# Altium footprint library Footprints.PcbLib: 320 footprints (part 1 of 20)
Each footprint in its own frame and in the unit in brackets; x right, y up, seen from the top. Pads: shape width x height; smd on the part's side, far side on the other; paste and mask are expansions set on the pad; w line width, h text height; cw(c..) or ccw(c..) is an arc to the next point about the centre after c.
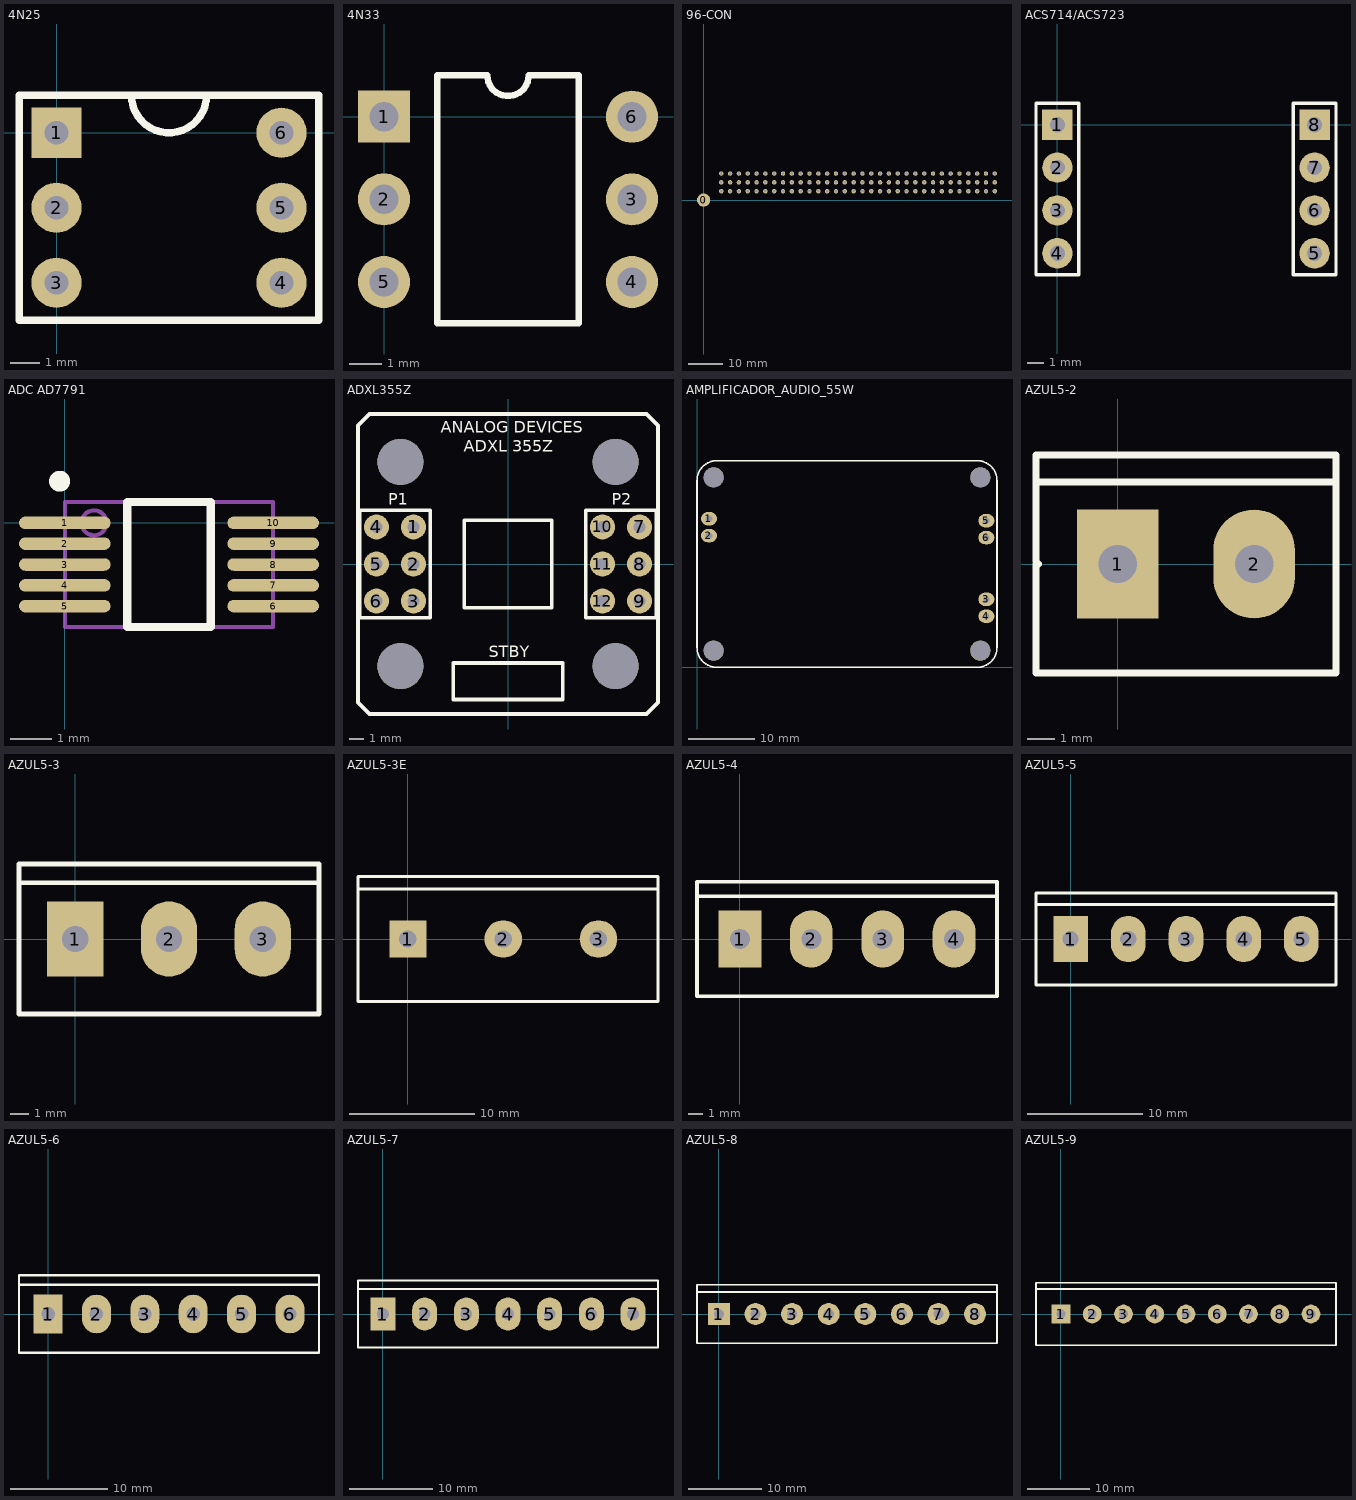
[diagram p0: the footprints below, top view; thin cyan lines are the x and y axes]

## 4N25 [mm]
pads (6):
  rect 1.7x1.7 hole 0.8: 1(0,0)
  round 1.7 hole 0.8: 2(0,-2.54) 3(0,-5.08) 4(7.62,-5.08) 5(7.62,-2.54) 6(7.62,0)
Top Overlay:
  lines w0.254: 2.54,1.27 ccw(c3.81,1.27) 5.08,1.27 ; -1.27,-6.35 8.89,-6.35 8.89,1.27 -1.27,1.27 -1.27,-6.35

## 4N33 [mm]
pads (6):
  rect 1.6x1.6 hole 0.9: 1(0,0)
  round 1.6 hole 0.9: 2(0,-2.54) 3(7.62,-2.54) 4(7.62,-5.08) 5(0,-5.08) 6(7.62,0)
Top Overlay:
  lines w0.2: 1.635,-6.35 1.635,1.27 3.175,1.27 ccw(c3.81,1.27) 4.445,1.27 5.985,1.27 5.985,-6.35 1.635,-6.35

## 96-CON [mil]
pads (97):
  round 150 hole 30: 0(0,0)
  round 50 hole 30: 1(3300,300) 2(3200,300) 3(3100,300) 4(3000,300) 5(2900,300) 6(2800,300) 7(2700,300) 8(2600,300) 9(2500,300) 10(2400,300) 11(2300,300) 12(2200,300) 13(2100,300) 14(2000,300) 15(1900,300) 16(1800,300) 17(1700,300) 18(1600,300) 19(1500,300) 20(1400,300) 21(1300,300) 22(1200,300) 23(1100,300) 24(1000,300) 25(900,300) 26(800,300) 27(700,300) 28(600,300) 29(500,300) 30(400,300) 31(300,300) 32(200,300) 33(3300,200) 34(3200,200) 35(3100,200) 36(3000,200) 37(2900,200) 38(2800,200) 39(2700,200) 40(2600,200) 41(2500,200) 42(2400,200) 43(2300,200) 44(2200,200) 45(2100,200) 46(2000,200) 47(1900,200) 48(1800,200) 49(1700,200) 50(1600,200) 51(1500,200) 52(1400,200) 53(1300,200) 54(1200,200) 55(1100,200) 56(1000,200) 57(900,200) 58(800,200) 59(700,200) 60(600,200) 61(500,200) 62(400,200) 63(300,200) 64(200,200) 65(3300,100) 66(3200,100) 67(3100,100) 68(3000,100) 69(2900,100) 70(2800,100) 71(2700,100) 72(2600,100) 73(2500,100) 74(2400,100) 75(2300,100) 76(2200,100) 77(2100,100) 78(2000,100) 79(1900,100) 80(1800,100) 81(1700,100) 82(1600,100) 83(1500,100) 84(1400,100) 85(1300,100) 86(1200,100) 87(1100,100) 88(1000,100) 89(900,100) 90(800,100) 91(700,100) 92(600,100) 93(500,100) 94(400,100) 95(300,100) 96(200,100)

## ACS714/ACS723 [mm]
pads (8):
  rect 1.8x1.8 hole 0.9: 1(0,0) 8(15.24,0)
  round 1.8 hole 0.9: 2(0,-2.54) 3(0,-5.08) 4(0,-7.62) 5(15.24,-7.62) 6(15.24,-5.08) 7(15.24,-2.54)
Top Overlay:
  lines w0.2: 1.27,-0.635 1.27,1.27 ; 16.51,-0.635 16.51,1.27 ; 1.27,1.27 -1.27,1.27 -1.27,-8.89 1.27,-8.89 1.27,1.27 ; 16.51,1.27 13.97,1.27 13.97,-8.89 16.51,-8.89 16.51,1.27
3D body: height 0, standoff 0, extent -1.27,-8.89 16.51,1.27

## ADC AD7791 [mm]
pads (10):
  oval 2.2x0.3 smd: 1(0,0) 2(0,-0.5) 3(0,-1) 4(0,-1.5) 5(0,-2) 6(5,-2) 7(5,-1.5) 8(5,-1) 9(5,-0.5) 10(5,0)
Top Overlay:
  circle w0.25: c-0.125,1 r0.125
  lines w0.2: 1.5,-2.5 3.5,-2.5 3.5,0.5 1.5,0.5 1.5,-2.5
Mechanical 13:
  circle w0.1: c0.7,0 r0.3
  lines w0.1: 0,-2.5 0,0.5 5,0.5 5,-2.5 0,-2.5
3D body: height 1.75, standoff 0, extent 0,-2.5 5,0.5

## ADXL355Z [mm]
pads (16):
  round 1.7 hole 0.8: 1(-6.48,2.54) 2(-6.48,0) 3(-6.48,-2.54) 4(-9.02,2.54) 5(-9.02,0) 6(-9.02,-2.54) 7(9.02,2.54) 8(9.02,0) 9(9.02,-2.54) 10(6.48,2.54) 11(6.48,0) 12(6.48,-2.54)
  round 3.15 hole 3.15: ""(-7.375,-7) ""(-7.375,7) ""(7.375,-7) ""(7.375,7)
Top Overlay:
  lines w0.254: -10.287,-9.5 -9.5,-10.287 9.5,-10.287 10.287,-9.5 10.287,9.5 9.5,10.287 -9.5,10.287 -10.287,9.5 -10.287,-9.5 ; -10.16,-3.683 -10.16,3.683 -5.334,3.683 -5.334,-3.683 -10.16,-3.683 ; -3.75,-9.287 3.75,-9.287 3.75,-6.787 -3.75,-6.787 -3.75,-9.287 ; -3,-3 -3,3 3,3 3,-3 -3,-3 ; 5.334,-3.683 5.334,3.683 10.16,3.683 10.16,-3.683 5.334,-3.683
  text "P1" at -8.198,4.064 h0.8
  text "P2" at 7.124,4.064 h0.8
  text "STBY" at -1.331,-6.406 h0.8
  text "ANALOG DEVICES" at -4.624,9 h0.8
  text "ADXL 355Z" at -3.032,7.713 h0.8

## AMPLIFICADOR_AUDIO_55W [mm]
pads (10):
  oval 2.4x2 hole 1: 1(1.8,22.3) 2(1.8,19.76) 3(43.4,10.2) 4(43.4,7.66) 5(43.4,22) 6(43.4,19.46)
  round 3 hole 3: ""(2.5,2.5) ""(2.5,28.5) ""(42.5,2.5) ""(42.5,28.5)
Top Overlay:
  lines w0.25: 0,3 ccw(c3,3) 3,0 42,0 ccw(c42,3) 45,3 45,28 ccw(c42,28) 42,31 3,31 ccw(c3,28) 0,28 0,3
3D body "Driver TDA8932BT.step": height 11.9, standoff -6.69, extent 0,0 45,31

## AZUL5-2 [mm]
pads (2):
  rect 3x4 hole 1.4: 1(0,0)
  oval 3x4 hole 1.4: 2(5,0)
Top Overlay:
  lines w0.254: -3,0 -3,-4 8,-4 8,4 -3,4 -3,0.1 -2.9,0 ; -3,3 8,3

## AZUL5-3 [mm]
pads (3):
  rect 3x4 hole 1.4: 1(0,0)
  oval 3x4 hole 1.4: 2(5,0) 3(10,0)
Top Overlay:
  lines w0.254: -3,3 13,3 ; -3,-4 -3,0 -3,4 13,4 13,-4 -3,-4

## AZUL5-3E [mm]
pads (3):
  rect 3x3 hole 1.4: 1(0,0)
  round 3 hole 1.4: 2(7.62,0) 3(15.24,0)
Top Overlay:
  lines w0.254: -4,-0.01 -4,5 20,5 20,-5 -4,-5 -4,0 ; -4,4 20,4

## AZUL5-4 [mm]
pads (4):
  rect 3x4 hole 1.4: 1(0,0)
  oval 3x4 hole 1.4: 2(5,0) 3(10,0) 4(15,0)
Top Overlay:
  lines w0.254: -3,3 18,3 ; -3,-4 18,-4 18,4 -3,4 -3,0 -3,-4

## AZUL5-5 [mm]
pads (5):
  rect 3x4 hole 1.4: 1(0,0)
  oval 3x4 hole 1.4: 2(5,0) 3(10,0) 4(15,0) 5(20,0)
Top Overlay:
  lines w0.254: -3,3 23,3 ; -3,-4 23,-4 23,4 -3,4 -3,0 -3,-4

## AZUL5-6 [mm]
pads (6):
  rect 3x4 hole 1.4: 1(0,0)
  oval 3x4 hole 1.4: 2(5,0) 3(10,0) 4(15,0) 5(20,0) 6(25,0)
Top Overlay:
  lines w0.254: -3,3 28,3 ; -3,-4 -3,0 -3,4 28,4 28,-4 -3,-4

## AZUL5-7 [mm]
pads (7):
  rect 3x4 hole 1.4: 1(0,0)
  oval 3x4 hole 1.4: 2(5,0) 3(10,0) 4(15,0) 5(20,0) 6(25,0) 7(30,0)
Top Overlay:
  lines w0.254: -3,3 33,3 ; -3,-4 -3,0 -3,4 33,4 33,-4 -3,-4

## AZUL5-8 [mm]
pads (8):
  rect 3x3 hole 1.4: 1(0,0)
  round 3 hole 1.4: 2(5,0) 3(10,0) 4(15,0) 5(20,0) 6(25,0) 7(30,0) 8(35,0)
Top Overlay:
  lines w0.254: -3,-0.11 -3,4 38,4 38,2.03 38,-4 -3,-4 -3,0 ; -3,3 37.96,3

## AZUL5-9 [mm]
pads (9):
  rect 3x3 hole 1.4: 1(0,0)
  round 3 hole 1.4: 2(5,0) 3(10,0) 4(15,0) 5(20,0) 6(25,0) 7(30,0) 8(35,0) 9(40,0)
Top Overlay:
  lines w0.254: -4,-0.06 -4,5 44,5 44,-5 -4,-5 -4,0 ; -3.98,4 44,4